# Altium footprint library FootPrintLib_9.PcbLib: 287 footprints (part 17 of 18)
Each footprint in its own frame and in the unit in brackets; x right, y up, seen from the top. Pads: shape width x height; smd on the part's side, far side on the other; paste and mask are expansions set on the pad; w line width, h text height; cw(c..) or ccw(c..) is an arc to the next point about the centre after c.
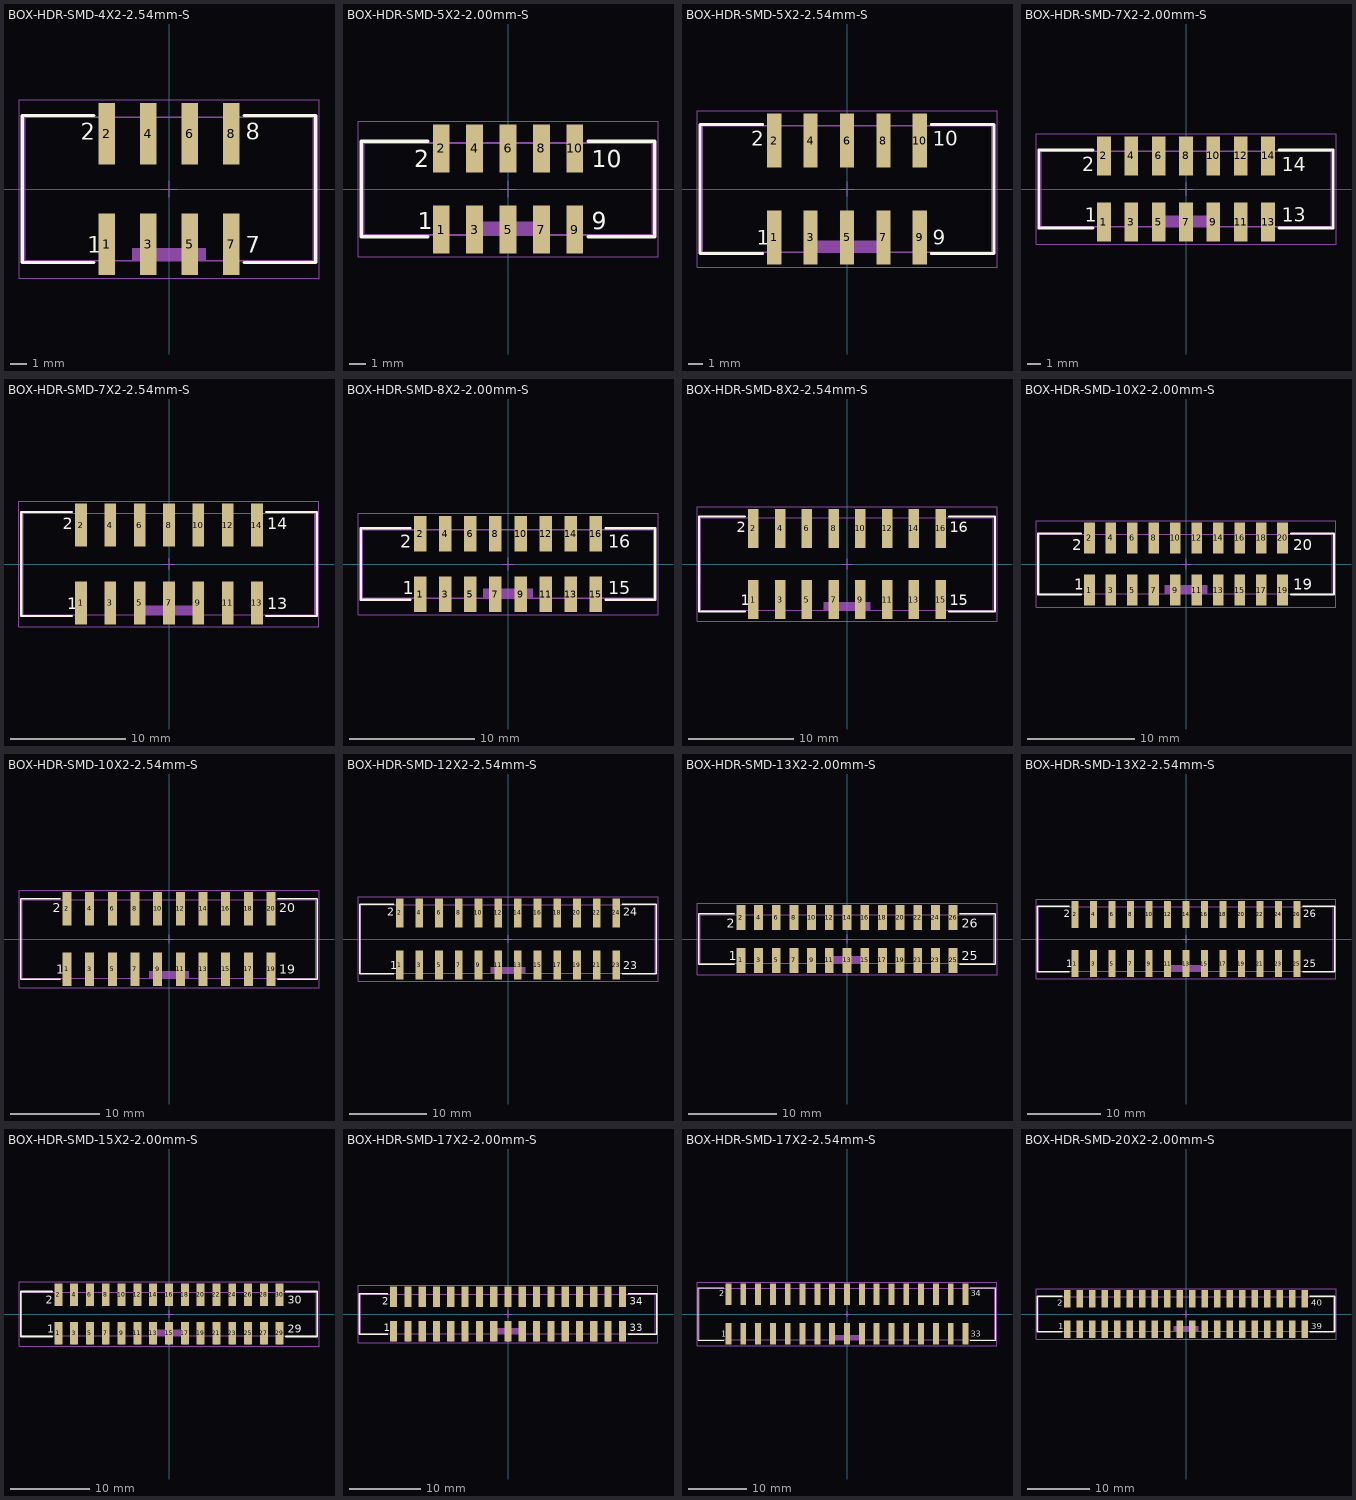
[diagram p16: the footprints below, top view; thin cyan lines are the x and y axes]

## BOX-HDR-SMD-4X2-2.54mm-S [mm] "8 pins, SMT, straight, gold plating"
height 9.2
pads (8):
  rect 1x3.75 smd: 1(-3.81,-3.375) 2(-3.81,3.375) 3(-1.27,-3.375) 4(-1.27,3.375) 5(1.27,-3.375) 6(1.27,3.375) 7(3.81,-3.375) 8(3.81,3.375)
Top Overlay:
  lines w0.2: -4.6,-4.5 -8.98,-4.5 -8.98,4.5 -4.6,4.5 ; 4.6,-4.5 8.98,-4.5 8.98,4.5 4.6,4.5
  text "7" at 4.7,-3.9 h1.02
  text "2" at -5.4,3 h1.02
  text "1" at -5,-3.9 h1.02
  text "8" at 4.7,3 h1.02
Mechanical 13:
  rectangle: -2.25,-4.4 2.25,-3.6
  lines w0.1: -8.83,-4.4 -8.83,4.4 8.83,4.4 8.83,-4.4 -8.83,-4.4
Mechanical 15:
  lines w0.05: -0.5,0 0.5,0 ; 0,-0.5 0,0.5 ; -9.18,-5.45 9.18,-5.45 9.18,5.45 -9.18,5.45 -9.18,-5.45
3D body "61200820621.stp": height 10.2, standoff 0.01, extent -8.89,-4.75 8.89,4.75

## BOX-HDR-SMD-5X2-2.00mm-S [mm] "2.00mm Male SMT Box Header, 10p"
height 6.8
pads (10):
  rect 1x2.85 smd: 1(-4,-2.425) 2(-4,2.425) 3(-2,-2.425) 4(-2,2.425) 5(0,-2.425) 6(0,2.425) 7(2,-2.425) 8(2,2.425) 9(4,-2.425) 10(4,2.425)
Top Overlay:
  lines w0.2: -4.8,-2.85 -8.775,-2.85 -8.775,2.85 -4.8,2.85 ; 4.8,-2.85 8.775,-2.85 8.775,2.85 4.8,2.85
  text "10" at 5,1.3 h1.02
  text "9" at 5,-2.4 h1.02
  text "2" at -5.6,1.3 h1.02
  text "1" at -5.4,-2.4 h1.02
Mechanical 13:
  rectangle: -2,-2.75 2,-1.95
  lines w0.1: -4.25,-2.75 -4.25,-3.75 -3.75,-3.75 -3.75,-2.75 ; -4.25,2.75 -4.25,3.75 -3.75,3.75 -3.75,2.75 ; -2.25,-2.75 -2.25,-3.75 -1.75,-3.75 -1.75,-2.75 ; -2.25,2.75 -2.25,3.75 -1.75,3.75 -1.75,2.75 ; -0.25,-2.75 -0.25,-3.75 0.25,-3.75 0.25,-2.75 ; -0.25,2.75 -0.25,3.75 0.25,3.75 0.25,2.75 ; 1.75,-2.75 1.75,-3.75 2.25,-3.75 2.25,-2.75 ; 1.75,2.75 1.75,3.75 2.25,3.75 2.25,2.75 ; 3.75,-2.75 3.75,-3.75 4.25,-3.75 4.25,-2.75 ; 3.75,2.75 3.75,3.75 4.25,3.75 4.25,2.75 ; -8.625,-2.75 8.625,-2.75 8.625,2.75 -8.625,2.75 -8.625,-2.75
Mechanical 15:
  lines w0.05: -0.5,0 0.5,0 ; 0,-0.5 0,0.5 ; -8.975,-4.05 -8.975,4.05 8.975,4.05 8.975,-4.05 -8.975,-4.05
3D body "62531020621 (rev1).stp": height 8.55, standoff 0, extent -8.625,-3.75 8.625,3.75

## BOX-HDR-SMD-5X2-2.54mm-S [mm] "10 pins, SMT, straight, gold plating"
height 9.2
pads (10):
  rect 1x3.75 smd: 1(-5.08,-3.375) 2(-5.08,3.375) 3(-2.54,-3.375) 4(-2.54,3.375) 5(0,-3.375) 6(0,3.375) 7(2.54,-3.375) 8(2.54,3.375) 9(5.08,-3.375) 10(5.08,3.375)
Top Overlay:
  lines w0.2: -5.87,-4.5 -10.25,-4.5 -10.25,4.5 -5.87,4.5 ; 5.87,-4.5 10.25,-4.5 10.25,4.5 5.87,4.5
  text "9" at 5.97,-3.9 h1.02
  text "10" at 5.97,3 h1.02
  text "2" at -6.67,3 h1.02
  text "1" at -6.27,-3.9 h1.02
Mechanical 13:
  rectangle: -2.25,-4.4 2.25,-3.6
  lines w0.1: -10.1,-4.4 -10.1,4.4 10.1,4.4 10.1,-4.4 -10.1,-4.4
Mechanical 15:
  lines w0.05: -0.5,0 0.5,0 ; 0,-0.5 0,0.5 ; -10.45,-5.45 10.45,-5.45 10.45,5.45 -10.45,5.45 -10.45,-5.45
3D body "61201020621.stp": height 10.2, standoff 0.01, extent -10.16,-4.75 10.16,4.75

## BOX-HDR-SMD-7X2-2.00mm-S [mm] "2.00mm Male SMT Box Header, 14p"
height 6.8
pads (14):
  rect 1x2.85 smd: 1(-6,-2.425) 2(-6,2.425) 3(-4,-2.425) 4(-4,2.425) 5(-2,-2.425) 6(-2,2.425) 7(0,-2.425) 8(0,2.425) 9(2,-2.425) 10(2,2.425) 11(4,-2.425) 12(4,2.425) 13(6,-2.425) 14(6,2.425)
Top Overlay:
  lines w0.2: -6.8,-2.85 -10.775,-2.85 -10.775,2.85 -6.8,2.85 ; 6.8,-2.85 10.775,-2.85 10.775,2.85 6.8,2.85
  text "13" at 7,-2.4 h1.02
  text "14" at 7,1.3 h1.02
  text "1" at -7.4,-2.4 h1.02
  text "2" at -7.6,1.3 h1.02
Mechanical 13:
  rectangle: -2,-2.75 2,-1.95
  lines w0.1: -6.25,-2.75 -6.25,-3.75 -5.75,-3.75 -5.75,-2.75 ; -6.25,2.75 -6.25,3.75 -5.75,3.75 -5.75,2.75 ; -4.25,-2.75 -4.25,-3.75 -3.75,-3.75 -3.75,-2.75 ; -4.25,2.75 -4.25,3.75 -3.75,3.75 -3.75,2.75 ; -2.25,-2.75 -2.25,-3.75 -1.75,-3.75 -1.75,-2.75 ; -2.25,2.75 -2.25,3.75 -1.75,3.75 -1.75,2.75 ; -0.25,-2.75 -0.25,-3.75 0.25,-3.75 0.25,-2.75 ; -0.25,2.75 -0.25,3.75 0.25,3.75 0.25,2.75 ; 1.75,-2.75 1.75,-3.75 2.25,-3.75 2.25,-2.75 ; 1.75,2.75 1.75,3.75 2.25,3.75 2.25,2.75 ; 3.75,-2.75 3.75,-3.75 4.25,-3.75 4.25,-2.75 ; 3.75,2.75 3.75,3.75 4.25,3.75 4.25,2.75 ; 5.75,-2.75 5.75,-3.75 6.25,-3.75 6.25,-2.75 ; 5.75,2.75 5.75,3.75 6.25,3.75 6.25,2.75 ; -10.625,-2.75 -10.625,2.75 10.625,2.75 10.625,-2.75 -10.625,-2.75
Mechanical 15:
  lines w0.05: -0.5,0 0.5,0 ; 0,-0.5 0,0.5 ; -10.975,-4.05 10.975,-4.05 10.975,4.05 -10.975,4.05 -10.975,-4.05
3D body "62531420621 (rev1).stp": height 8.55, standoff 0, extent -10.625,-3.75 10.625,3.75

## BOX-HDR-SMD-7X2-2.54mm-S [mm] "14 pins, SMT, straight, gold plating"
height 9.2
pads (14):
  rect 1x3.75 smd: 1(-7.62,-3.375) 2(-7.62,3.375) 3(-5.08,-3.375) 4(-5.08,3.375) 5(-2.54,-3.375) 6(-2.54,3.375) 7(0,-3.375) 8(0,3.375) 9(2.54,-3.375) 10(2.54,3.375) 11(5.08,-3.375) 12(5.08,3.375) 13(7.62,-3.375) 14(7.62,3.375)
Top Overlay:
  lines w0.2: -8.41,-4.5 -12.79,-4.5 -12.79,4.5 -8.41,4.5 ; 8.41,-4.5 12.79,-4.5 12.79,4.5 8.41,4.5
  text "13" at 8.51,-3.9 h1.02
  text "14" at 8.51,3 h1.02
  text "2" at -9.21,3 h1.02
  text "1" at -8.81,-3.9 h1.02
Mechanical 13:
  rectangle: -2.25,-4.4 2.25,-3.6
  lines w0.1: -12.64,-4.4 -12.64,4.4 12.64,4.4 12.64,-4.4 -12.64,-4.4
Mechanical 15:
  lines w0.05: -0.5,0 0.5,0 ; 0,-0.5 0,0.5 ; -12.99,-5.45 12.99,-5.45 12.99,5.45 -12.99,5.45 -12.99,-5.45
3D body "61201420621.stp": height 10.2, standoff 0.01, extent -12.7,-4.75 12.7,4.75

## BOX-HDR-SMD-8X2-2.00mm-S [mm] "2.00mm Male SMT Box Header, 16p"
height 6.8
pads (16):
  rect 1x2.85 smd: 1(-7,-2.425) 2(-7,2.425) 3(-5,-2.425) 4(-5,2.425) 5(-3,-2.425) 6(-3,2.425) 7(-1,-2.425) 8(-1,2.425) 9(1,-2.425) 10(1,2.425) 11(3,-2.425) 12(3,2.425) 13(5,-2.425) 14(5,2.425) 15(7,-2.425) 16(7,2.425)
Top Overlay:
  lines w0.2: -7.8,-2.85 -11.775,-2.85 -11.775,2.85 -7.8,2.85 ; 7.8,-2.85 11.775,-2.85 11.775,2.85 7.8,2.85
  text "1" at -8.4,-2.4 h1.02
  text "2" at -8.6,1.3 h1.02
  text "16" at 8,1.3 h1.02
  text "15" at 8,-2.4 h1.02
Mechanical 13:
  rectangle: -2,-2.75 2,-1.95
  lines w0.1: -7.25,-2.75 -7.25,-3.75 -6.75,-3.75 -6.75,-2.75 ; -7.25,2.75 -7.25,3.75 -6.75,3.75 -6.75,2.75 ; -5.25,-2.75 -5.25,-3.75 -4.75,-3.75 -4.75,-2.75 ; -5.25,2.75 -5.25,3.75 -4.75,3.75 -4.75,2.75 ; -3.25,-2.75 -3.25,-3.75 -2.75,-3.75 -2.75,-2.75 ; -3.25,2.75 -3.25,3.75 -2.75,3.75 -2.75,2.75 ; -1.25,-2.75 -1.25,-3.75 -0.75,-3.75 -0.75,-2.75 ; -1.25,2.75 -1.25,3.75 -0.75,3.75 -0.75,2.75 ; 0.75,-2.75 0.75,-3.75 1.25,-3.75 1.25,-2.75 ; 0.75,2.75 0.75,3.75 1.25,3.75 1.25,2.75 ; 2.75,-2.75 2.75,-3.75 3.25,-3.75 3.25,-2.75 ; 2.75,2.75 2.75,3.75 3.25,3.75 3.25,2.75 ; 4.75,-2.75 4.75,-3.75 5.25,-3.75 5.25,-2.75 ; 4.75,2.75 4.75,3.75 5.25,3.75 5.25,2.75 ; 6.75,-2.75 6.75,-3.75 7.25,-3.75 7.25,-2.75 ; 6.75,2.75 6.75,3.75 7.25,3.75 7.25,2.75 ; -11.625,-2.75 -11.625,2.75 11.625,2.75 11.625,-2.75 -11.625,-2.75
Mechanical 15:
  lines w0.05: -0.5,0 0.5,0 ; 0,-0.5 0,0.5 ; -11.975,-4.05 11.975,-4.05 11.975,4.05 -11.975,4.05 -11.975,-4.05
3D body "62531620621 (rev1).stp": height 8.55, standoff 0, extent -11.625,-3.75 11.625,3.75

## BOX-HDR-SMD-8X2-2.54mm-S [mm] "16 pins, SMT, straight, gold plating"
height 9.2
pads (16):
  rect 1x3.75 smd: 1(-8.89,-3.375) 2(-8.89,3.375) 3(-6.35,-3.375) 4(-6.35,3.375) 5(-3.81,-3.375) 6(-3.81,3.375) 7(-1.27,-3.375) 8(-1.27,3.375) 9(1.27,-3.375) 10(1.27,3.375) 11(3.81,-3.375) 12(3.81,3.375) 13(6.35,-3.375) 14(6.35,3.375) 15(8.89,-3.375) 16(8.89,3.375)
Top Overlay:
  lines w0.2: -9.68,-4.5 -14.06,-4.5 -14.06,4.5 -9.68,4.5 ; 9.68,-4.5 14.06,-4.5 14.06,4.5 9.68,4.5
  text "15" at 9.78,-3.9 h1.02
  text "16" at 9.78,3 h1.02
  text "1" at -10.08,-3.9 h1.02
  text "2" at -10.48,3 h1.02
Mechanical 13:
  rectangle: -2.25,-4.4 2.25,-3.6
  lines w0.1: -13.91,-4.4 13.91,-4.4 13.91,4.4 -13.91,4.4 -13.91,-4.4
Mechanical 15:
  lines w0.05: -0.5,0 0.5,0 ; 0,-0.5 0,0.5 ; -14.26,-5.45 -14.26,5.45 14.26,5.45 14.26,-5.45 -14.26,-5.45
3D body "61201620621.stp": height 10.2, standoff 0.01, extent -13.97,-4.75 13.97,4.75

## BOX-HDR-SMD-10X2-2.00mm-S [mm] "2.00mm Male SMT Box Header, 20p"
height 6.8
pads (20):
  rect 1x2.85 smd: 1(-9,-2.425) 2(-9,2.425) 3(-7,-2.425) 4(-7,2.425) 5(-5,-2.425) 6(-5,2.425) 7(-3,-2.425) 8(-3,2.425) 9(-1,-2.425) 10(-1,2.425) 11(1,-2.425) 12(1,2.425) 13(3,-2.425) 14(3,2.425) 15(5,-2.425) 16(5,2.425) 17(7,-2.425) 18(7,2.425) 19(9,-2.425) 20(9,2.425)
Top Overlay:
  lines w0.2: -9.8,-2.85 -13.775,-2.85 -13.775,2.85 -9.8,2.85 ; 9.8,-2.85 13.775,-2.85 13.775,2.85 9.8,2.85
  text "1" at -10.4,-2.4 h1.02
  text "2" at -10.6,1.3 h1.02
  text "20" at 10,1.3 h1.02
  text "19" at 10,-2.4 h1.02
Mechanical 13:
  rectangle: -2,-2.75 2,-1.95
  lines w0.1: -9.25,-2.75 -9.25,-3.75 -8.75,-3.75 -8.75,-2.75 ; -9.25,2.75 -9.25,3.75 -8.75,3.75 -8.75,2.75 ; -7.25,-2.75 -7.25,-3.75 -6.75,-3.75 -6.75,-2.75 ; -7.25,2.75 -7.25,3.75 -6.75,3.75 -6.75,2.75 ; -5.25,-2.75 -5.25,-3.75 -4.75,-3.75 -4.75,-2.75 ; -5.25,2.75 -5.25,3.75 -4.75,3.75 -4.75,2.75 ; -3.25,-2.75 -3.25,-3.75 -2.75,-3.75 -2.75,-2.75 ; -3.25,2.75 -3.25,3.75 -2.75,3.75 -2.75,2.75 ; -1.25,-2.75 -1.25,-3.75 -0.75,-3.75 -0.75,-2.75 ; -1.25,2.75 -1.25,3.75 -0.75,3.75 -0.75,2.75 ; 0.75,-2.75 0.75,-3.75 1.25,-3.75 1.25,-2.75 ; 0.75,2.75 0.75,3.75 1.25,3.75 1.25,2.75 ; 2.75,-2.75 2.75,-3.75 3.25,-3.75 3.25,-2.75 ; 2.75,2.75 2.75,3.75 3.25,3.75 3.25,2.75 ; 4.75,-2.75 4.75,-3.75 5.25,-3.75 5.25,-2.75 ; 4.75,2.75 4.75,3.75 5.25,3.75 5.25,2.75 ; 6.75,-2.75 6.75,-3.75 7.25,-3.75 7.25,-2.75 ; 6.75,2.75 6.75,3.75 7.25,3.75 7.25,2.75 ; 8.75,-2.75 8.75,-3.75 9.25,-3.75 9.25,-2.75 ; 8.75,2.75 8.75,3.75 9.25,3.75 9.25,2.75 ; -13.625,-2.75 -13.625,2.75 13.625,2.75 13.625,-2.75 -13.625,-2.75
Mechanical 15:
  lines w0.05: -0.5,0 0.5,0 ; 0,-0.5 0,0.5 ; -13.975,-4.05 13.975,-4.05 13.975,4.05 -13.975,4.05 -13.975,-4.05
3D body "62532020621 (rev1).stp": height 8.55, standoff 0, extent -13.625,-3.75 13.625,3.75

## BOX-HDR-SMD-10X2-2.54mm-S [mm] "20 pins, SMT, straight, gold plating"
height 9.2
pads (20):
  rect 1x3.75 smd: 1(-11.43,-3.375) 2(-11.43,3.375) 3(-8.89,-3.375) 4(-8.89,3.375) 5(-6.35,-3.375) 6(-6.35,3.375) 7(-3.81,-3.375) 8(-3.81,3.375) 9(-1.27,-3.375) 10(-1.27,3.375) 11(1.27,-3.375) 12(1.27,3.375) 13(3.81,-3.375) 14(3.81,3.375) 15(6.35,-3.375) 16(6.35,3.375) 17(8.89,-3.375) 18(8.89,3.375) 19(11.43,-3.375) 20(11.43,3.375)
Top Overlay:
  lines w0.2: -12.22,-4.5 -16.6,-4.5 -16.6,4.5 -12.22,4.5 ; 12.22,-4.5 16.6,-4.5 16.6,4.5 12.22,4.5
  text "19" at 12.32,-3.9 h1.02
  text "20" at 12.32,3 h1.02
  text "1" at -12.62,-3.9 h1.02
  text "2" at -13.02,3 h1.02
Mechanical 13:
  rectangle: -2.25,-4.4 2.25,-3.6
  lines w0.1: -16.45,-4.4 16.45,-4.4 16.45,4.4 -16.45,4.4 -16.45,-4.4
Mechanical 15:
  lines w0.05: -0.5,0 0.5,0 ; 0,-0.5 0,0.5 ; -16.8,-5.45 -16.8,5.45 16.8,5.45 16.8,-5.45 -16.8,-5.45
3D body "61202020621.stp": height 10.2, standoff 0.01, extent -16.51,-4.75 16.51,4.75

## BOX-HDR-SMD-12X2-2.54mm-S [mm] "24 pins, SMT, straight, gold plating"
height 9.2
pads (24):
  rect 1x3.75 smd: 1(-13.97,-3.375) 2(-13.97,3.375) 3(-11.43,-3.375) 4(-11.43,3.375) 5(-8.89,-3.375) 6(-8.89,3.375) 7(-6.35,-3.375) 8(-6.35,3.375) 9(-3.81,-3.375) 10(-3.81,3.375) 11(-1.27,-3.375) 12(-1.27,3.375) 13(1.27,-3.375) 14(1.27,3.375) 15(3.81,-3.375) 16(3.81,3.375) 17(6.35,-3.375) 18(6.35,3.375) 19(8.89,-3.375) 20(8.89,3.375) 21(11.43,-3.375) 22(11.43,3.375) 23(13.97,-3.375) 24(13.97,3.375)
Top Overlay:
  lines w0.2: -14.76,-4.5 -19.14,-4.5 -19.14,4.5 -14.76,4.5 ; 14.76,-4.5 19.14,-4.5 19.14,4.5 14.76,4.5
  text "1" at -15.16,-3.9 h1.02
  text "2" at -15.56,3 h1.02
  text "24" at 14.86,3 h1.02
  text "23" at 14.86,-3.9 h1.02
Mechanical 13:
  rectangle: -2.25,-4.4 2.25,-3.6
  lines w0.1: -18.99,-4.4 18.99,-4.4 18.99,4.4 -18.99,4.4 -18.99,-4.4
Mechanical 15:
  lines w0.05: -0.5,0 0.5,0 ; 0,-0.5 0,0.5 ; -19.34,-5.45 -19.34,5.45 19.34,5.45 19.34,-5.45 -19.34,-5.45
3D body "61202420621.stp": height 10.2, standoff 0.01, extent -19.05,-4.75 19.05,4.75

## BOX-HDR-SMD-13X2-2.00mm-S [mm] "2.00mm Male SMT Box Header, 26p"
height 6.8
pads (26):
  rect 1x2.85 smd: 1(-12,-2.425) 2(-12,2.425) 3(-10,-2.425) 4(-10,2.425) 5(-8,-2.425) 6(-8,2.425) 7(-6,-2.425) 8(-6,2.425) 9(-4,-2.425) 10(-4,2.425) 11(-2,-2.425) 12(-2,2.425) 13(0,-2.425) 14(0,2.425) 15(2,-2.425) 16(2,2.425) 17(4,-2.425) 18(4,2.425) 19(6,-2.425) 20(6,2.425) 21(8,-2.425) 22(8,2.425) 23(10,-2.425) 24(10,2.425) 25(12,-2.425) 26(12,2.425)
Top Overlay:
  lines w0.2: -12.8,-2.85 -16.775,-2.85 -16.775,2.85 -12.8,2.85 ; 12.8,-2.85 16.775,-2.85 16.775,2.85 12.8,2.85
  text "2" at -13.6,1.3 h1.02
  text "1" at -13.4,-2.4 h1.02
  text "26" at 13,1.3 h1.02
  text "25" at 13,-2.4 h1.02
Mechanical 13:
  rectangle: -2,-2.75 2,-1.95
  lines w0.1: -12.25,-2.75 -12.25,-3.75 -11.75,-3.75 -11.75,-2.75 ; -12.25,2.75 -12.25,3.75 -11.75,3.75 -11.75,2.75 ; -10.25,-2.75 -10.25,-3.75 -9.75,-3.75 -9.75,-2.75 ; -10.25,2.75 -10.25,3.75 -9.75,3.75 -9.75,2.75 ; -8.25,-2.75 -8.25,-3.75 -7.75,-3.75 -7.75,-2.75 ; -8.25,2.75 -8.25,3.75 -7.75,3.75 -7.75,2.75 ; -6.25,-2.75 -6.25,-3.75 -5.75,-3.75 -5.75,-2.75 ; -6.25,2.75 -6.25,3.75 -5.75,3.75 -5.75,2.75 ; -4.25,-2.75 -4.25,-3.75 -3.75,-3.75 -3.75,-2.75 ; -4.25,2.75 -4.25,3.75 -3.75,3.75 -3.75,2.75 ; -2.25,-2.75 -2.25,-3.75 -1.75,-3.75 -1.75,-2.75 ; -2.25,2.75 -2.25,3.75 -1.75,3.75 -1.75,2.75 ; -0.25,-2.75 -0.25,-3.75 0.25,-3.75 0.25,-2.75 ; -0.25,2.75 -0.25,3.75 0.25,3.75 0.25,2.75 ; 1.75,-2.75 1.75,-3.75 2.25,-3.75 2.25,-2.75 ; 1.75,2.75 1.75,3.75 2.25,3.75 2.25,2.75 ; 3.75,-2.75 3.75,-3.75 4.25,-3.75 4.25,-2.75 ; 3.75,2.75 3.75,3.75 4.25,3.75 4.25,2.75 ; 5.75,-2.75 5.75,-3.75 6.25,-3.75 6.25,-2.75 ; 5.75,2.75 5.75,3.75 6.25,3.75 6.25,2.75 ; 7.75,-2.75 7.75,-3.75 8.25,-3.75 8.25,-2.75 ; 7.75,2.75 7.75,3.75 8.25,3.75 8.25,2.75 ; 9.75,-2.75 9.75,-3.75 10.25,-3.75 10.25,-2.75 ; 9.75,2.75 9.75,3.75 10.25,3.75 10.25,2.75 ; 11.75,-2.75 11.75,-3.75 12.25,-3.75 12.25,-2.75 ; 11.75,2.75 11.75,3.75 12.25,3.75 12.25,2.75 ; -16.625,-2.75 16.625,-2.75 16.625,2.75 -16.625,2.75 -16.625,-2.75
Mechanical 15:
  lines w0.05: -0.5,0 0.5,0 ; 0,-0.5 0,0.5 ; -16.975,-4.05 -16.975,4.05 16.975,4.05 16.975,-4.05 -16.975,-4.05
3D body "62532620621 (rev1).stp": height 8.55, standoff 0, extent -16.625,-3.75 16.625,3.75

## BOX-HDR-SMD-13X2-2.54mm-S [mm] "26 pins, SMT, straight, gold plating"
height 9.2
pads (26):
  rect 1x3.75 smd: 1(-15.24,-3.375) 2(-15.24,3.375) 3(-12.7,-3.375) 4(-12.7,3.375) 5(-10.16,-3.375) 6(-10.16,3.375) 7(-7.62,-3.375) 8(-7.62,3.375) 9(-5.08,-3.375) 10(-5.08,3.375) 11(-2.54,-3.375) 12(-2.54,3.375) 13(0,-3.375) 14(0,3.375) 15(2.54,-3.375) 16(2.54,3.375) 17(5.08,-3.375) 18(5.08,3.375) 19(7.62,-3.375) 20(7.62,3.375) 21(10.16,-3.375) 22(10.16,3.375) 23(12.7,-3.375) 24(12.7,3.375) 25(15.24,-3.375) 26(15.24,3.375)
Top Overlay:
  lines w0.2: -16.03,-4.5 -20.41,-4.5 -20.41,4.5 -16.03,4.5 ; 16.03,-4.5 20.41,-4.5 20.41,4.5 16.03,4.5
  text "25" at 16.13,-3.9 h1.02
  text "26" at 16.13,3 h1.02
  text "1" at -16.43,-3.9 h1.02
  text "2" at -16.83,3 h1.02
Mechanical 13:
  rectangle: -2.25,-4.4 2.25,-3.6
  lines w0.1: -20.26,-4.4 20.26,-4.4 20.26,4.4 -20.26,4.4 -20.26,-4.4
Mechanical 15:
  lines w0.05: -0.5,0 0.5,0 ; 0,-0.5 0,0.5 ; -20.61,-5.45 -20.61,5.45 20.61,5.45 20.61,-5.45 -20.61,-5.45
3D body "61202620621.stp": height 10.2, standoff 0.01, extent -20.32,-4.75 20.32,4.75

## BOX-HDR-SMD-15X2-2.00mm-S [mm] "2.00mm Male SMT Box Header, 30p"
height 6.8
pads (30):
  rect 1x2.85 smd: 1(-14,-2.425) 2(-14,2.425) 3(-12,-2.425) 4(-12,2.425) 5(-10,-2.425) 6(-10,2.425) 7(-8,-2.425) 8(-8,2.425) 9(-6,-2.425) 10(-6,2.425) 11(-4,-2.425) 12(-4,2.425) 13(-2,-2.425) 14(-2,2.425) 15(0,-2.425) 16(0,2.425) 17(2,-2.425) 18(2,2.425) 19(4,-2.425) 20(4,2.425) 21(6,-2.425) 22(6,2.425) 23(8,-2.425) 24(8,2.425) 25(10,-2.425) 26(10,2.425) 27(12,-2.425) 28(12,2.425) 29(14,-2.425) 30(14,2.425)
Top Overlay:
  lines w0.2: -14.8,-2.85 -18.775,-2.85 -18.775,2.85 -14.8,2.85 ; 14.8,-2.85 18.775,-2.85 18.775,2.85 14.8,2.85
  text "1" at -15.4,-2.4 h1.02
  text "2" at -15.6,1.3 h1.02
  text "30" at 15,1.3 h1.02
  text "29" at 15,-2.4 h1.02
Mechanical 13:
  rectangle: -2,-2.75 2,-1.95
  lines w0.1: -14.25,-2.75 -14.25,-3.75 -13.75,-3.75 -13.75,-2.75 ; -14.25,2.75 -14.25,3.75 -13.75,3.75 -13.75,2.75 ; -12.25,-2.75 -12.25,-3.75 -11.75,-3.75 -11.75,-2.75 ; -12.25,2.75 -12.25,3.75 -11.75,3.75 -11.75,2.75 ; -10.25,-2.75 -10.25,-3.75 -9.75,-3.75 -9.75,-2.75 ; -10.25,2.75 -10.25,3.75 -9.75,3.75 -9.75,2.75 ; -8.25,-2.75 -8.25,-3.75 -7.75,-3.75 -7.75,-2.75 ; -8.25,2.75 -8.25,3.75 -7.75,3.75 -7.75,2.75 ; -6.25,-2.75 -6.25,-3.75 -5.75,-3.75 -5.75,-2.75 ; -6.25,2.75 -6.25,3.75 -5.75,3.75 -5.75,2.75 ; -4.25,-2.75 -4.25,-3.75 -3.75,-3.75 -3.75,-2.75 ; -4.25,2.75 -4.25,3.75 -3.75,3.75 -3.75,2.75 ; -2.25,-2.75 -2.25,-3.75 -1.75,-3.75 -1.75,-2.75 ; -2.25,2.75 -2.25,3.75 -1.75,3.75 -1.75,2.75 ; -0.25,-2.75 -0.25,-3.75 0.25,-3.75 0.25,-2.75 ; -0.25,2.75 -0.25,3.75 0.25,3.75 0.25,2.75 ; 1.75,-2.75 1.75,-3.75 2.25,-3.75 2.25,-2.75 ; 1.75,2.75 1.75,3.75 2.25,3.75 2.25,2.75 ; 3.75,-2.75 3.75,-3.75 4.25,-3.75 4.25,-2.75 ; 3.75,2.75 3.75,3.75 4.25,3.75 4.25,2.75 ; 5.75,-2.75 5.75,-3.75 6.25,-3.75 6.25,-2.75 ; 5.75,2.75 5.75,3.75 6.25,3.75 6.25,2.75 ; 7.75,-2.75 7.75,-3.75 8.25,-3.75 8.25,-2.75 ; 7.75,2.75 7.75,3.75 8.25,3.75 8.25,2.75 ; 9.75,-2.75 9.75,-3.75 10.25,-3.75 10.25,-2.75 ; 9.75,2.75 9.75,3.75 10.25,3.75 10.25,2.75 ; 11.75,-2.75 11.75,-3.75 12.25,-3.75 12.25,-2.75 ; 11.75,2.75 11.75,3.75 12.25,3.75 12.25,2.75 ; 13.75,-2.75 13.75,-3.75 14.25,-3.75 14.25,-2.75 ; 13.75,2.75 13.75,3.75 14.25,3.75 14.25,2.75 ; -18.625,-2.75 -18.625,2.75 18.625,2.75 18.625,-2.75 -18.625,-2.75
Mechanical 15:
  lines w0.05: -0.5,0 0.5,0 ; 0,-0.5 0,0.5 ; -18.975,-4.05 18.975,-4.05 18.975,4.05 -18.975,4.05 -18.975,-4.05
3D body "62533020621 (rev1).stp": height 8.55, standoff 0, extent -18.625,-3.75 18.625,3.75

## BOX-HDR-SMD-17X2-2.00mm-S [mm] "2.00mm Male SMT Box Header, 34p"
height 6.8
pads (34):
  rect 1x2.85 smd: 1(-16,-2.425) 2(-16,2.425) 3(-14,-2.425) 4(-14,2.425) 5(-12,-2.425) 6(-12,2.425) 7(-10,-2.425) 8(-10,2.425) 9(-8,-2.425) 10(-8,2.425) 11(-6,-2.425) 12(-6,2.425) 13(-4,-2.425) 14(-4,2.425) 15(-2,-2.425) 16(-2,2.425) 17(0,-2.425) 18(0,2.425) 19(2,-2.425) 20(2,2.425) 21(4,-2.425) 22(4,2.425) 23(6,-2.425) 24(6,2.425) 25(8,-2.425) 26(8,2.425) 27(10,-2.425) 28(10,2.425) 29(12,-2.425) 30(12,2.425) 31(14,-2.425) 32(14,2.425) 33(16,-2.425) 34(16,2.425)
Top Overlay:
  lines w0.2: -16.8,-2.85 -20.775,-2.85 -20.775,2.85 -16.8,2.85 ; 16.8,-2.85 20.775,-2.85 20.775,2.85 16.8,2.85
  text "2" at -17.6,1.3 h1.02
  text "1" at -17.4,-2.4 h1.02
  text "34" at 17,1.3 h1.02
  text "33" at 17,-2.4 h1.02
Mechanical 13:
  rectangle: -2,-2.75 2,-1.95
  lines w0.1: -16.25,-2.75 -16.25,-3.75 -15.75,-3.75 -15.75,-2.75 ; -16.25,2.75 -16.25,3.75 -15.75,3.75 -15.75,2.75 ; -14.25,-2.75 -14.25,-3.75 -13.75,-3.75 -13.75,-2.75 ; -14.25,2.75 -14.25,3.75 -13.75,3.75 -13.75,2.75 ; -12.25,-2.75 -12.25,-3.75 -11.75,-3.75 -11.75,-2.75 ; -12.25,2.75 -12.25,3.75 -11.75,3.75 -11.75,2.75 ; -10.25,-2.75 -10.25,-3.75 -9.75,-3.75 -9.75,-2.75 ; -10.25,2.75 -10.25,3.75 -9.75,3.75 -9.75,2.75 ; -8.25,-2.75 -8.25,-3.75 -7.75,-3.75 -7.75,-2.75 ; -8.25,2.75 -8.25,3.75 -7.75,3.75 -7.75,2.75 ; -6.25,-2.75 -6.25,-3.75 -5.75,-3.75 -5.75,-2.75 ; -6.25,2.75 -6.25,3.75 -5.75,3.75 -5.75,2.75 ; -4.25,-2.75 -4.25,-3.75 -3.75,-3.75 -3.75,-2.75 ; -4.25,2.75 -4.25,3.75 -3.75,3.75 -3.75,2.75 ; -2.25,-2.75 -2.25,-3.75 -1.75,-3.75 -1.75,-2.75 ; -2.25,2.75 -2.25,3.75 -1.75,3.75 -1.75,2.75 ; -0.25,-2.75 -0.25,-3.75 0.25,-3.75 0.25,-2.75 ; -0.25,2.75 -0.25,3.75 0.25,3.75 0.25,2.75 ; 1.75,-2.75 1.75,-3.75 2.25,-3.75 2.25,-2.75 ; 1.75,2.75 1.75,3.75 2.25,3.75 2.25,2.75 ; 3.75,-2.75 3.75,-3.75 4.25,-3.75 4.25,-2.75 ; 3.75,2.75 3.75,3.75 4.25,3.75 4.25,2.75 ; 5.75,-2.75 5.75,-3.75 6.25,-3.75 6.25,-2.75 ; 5.75,2.75 5.75,3.75 6.25,3.75 6.25,2.75 ; 7.75,-2.75 7.75,-3.75 8.25,-3.75 8.25,-2.75 ; 7.75,2.75 7.75,3.75 8.25,3.75 8.25,2.75 ; 9.75,-2.75 9.75,-3.75 10.25,-3.75 10.25,-2.75 ; 9.75,2.75 9.75,3.75 10.25,3.75 10.25,2.75 ; 11.75,-2.75 11.75,-3.75 12.25,-3.75 12.25,-2.75 ; 11.75,2.75 11.75,3.75 12.25,3.75 12.25,2.75 ; 13.75,-2.75 13.75,-3.75 14.25,-3.75 14.25,-2.75 ; 13.75,2.75 13.75,3.75 14.25,3.75 14.25,2.75 ; 15.75,-2.75 15.75,-3.75 16.25,-3.75 16.25,-2.75 ; 15.75,2.75 15.75,3.75 16.25,3.75 16.25,2.75 ; -20.625,-2.75 20.625,-2.75 20.625,2.75 -20.625,2.75 -20.625,-2.75
Mechanical 15:
  lines w0.05: -0.5,0 0.5,0 ; 0,-0.5 0,0.5 ; -20.975,-4.05 -20.975,4.05 20.975,4.05 20.975,-4.05 -20.975,-4.05
3D body "62533420621 (rev1).stp": height 8.55, standoff 0, extent -20.625,-3.75 20.625,3.75

## BOX-HDR-SMD-17X2-2.54mm-S [mm] "34 pins, SMT, straight, gold plating"
height 9.2
pads (34):
  rect 1x3.75 smd: 1(-20.32,-3.375) 2(-20.32,3.375) 3(-17.78,-3.375) 4(-17.78,3.375) 5(-15.24,-3.375) 6(-15.24,3.375) 7(-12.7,-3.375) 8(-12.7,3.375) 9(-10.16,-3.375) 10(-10.16,3.375) 11(-7.62,-3.375) 12(-7.62,3.375) 13(-5.08,-3.375) 14(-5.08,3.375) 15(-2.54,-3.375) 16(-2.54,3.375) 17(0,-3.375) 18(0,3.375) 19(2.54,-3.375) 20(2.54,3.375) 21(5.08,-3.375) 22(5.08,3.375) 23(7.62,-3.375) 24(7.62,3.375) 25(10.16,-3.375) 26(10.16,3.375) 27(12.7,-3.375) 28(12.7,3.375) 29(15.24,-3.375) 30(15.24,3.375) 31(17.78,-3.375) 32(17.78,3.375) 33(20.32,-3.375) 34(20.32,3.375)
Top Overlay:
  lines w0.2: -21.11,-4.5 -25.49,-4.5 -25.49,4.5 -21.11,4.5 ; 21.11,-4.5 25.49,-4.5 25.49,4.5 21.11,4.5
  text "2" at -21.91,3 h1.02
  text "1" at -21.51,-3.9 h1.02
  text "34" at 21.21,3 h1.02
  text "33" at 21.21,-3.9 h1.02
Mechanical 13:
  rectangle: -2.25,-4.4 2.25,-3.6
  lines w0.1: -25.34,-4.4 -25.34,4.4 25.34,4.4 25.34,-4.4 -25.34,-4.4
Mechanical 15:
  lines w0.05: -0.5,0 0.5,0 ; 0,-0.5 0,0.5 ; -25.69,-5.45 25.69,-5.45 25.69,5.45 -25.69,5.45 -25.69,-5.45
3D body "61203420621.stp": height 10.2, standoff 0.01, extent -25.4,-4.75 25.4,4.75

## BOX-HDR-SMD-20X2-2.00mm-S [mm] "2.00mm Male SMT Box Header, 40p"
height 6.8
pads (40):
  rect 1x2.85 smd: 1(-19,-2.425) 2(-19,2.425) 3(-17,-2.425) 4(-17,2.425) 5(-15,-2.425) 6(-15,2.425) 7(-13,-2.425) 8(-13,2.425) 9(-11,-2.425) 10(-11,2.425) 11(-9,-2.425) 12(-9,2.425) 13(-7,-2.425) 14(-7,2.425) 15(-5,-2.425) 16(-5,2.425) 17(-3,-2.425) 18(-3,2.425) 19(-1,-2.425) 20(-1,2.425) 21(1,-2.425) 22(1,2.425) 23(3,-2.425) 24(3,2.425) 25(5,-2.425) 26(5,2.425) 27(7,-2.425) 28(7,2.425) 29(9,-2.425) 30(9,2.425) 31(11,-2.425) 32(11,2.425) 33(13,-2.425) 34(13,2.425) 35(15,-2.425) 36(15,2.425) 37(17,-2.425) 38(17,2.425) 39(19,-2.425) 40(19,2.425)
Top Overlay:
  lines w0.2: -19.8,-2.85 -23.775,-2.85 -23.775,2.85 -19.8,2.85 ; 19.8,-2.85 23.775,-2.85 23.775,2.85 19.8,2.85
  text "1" at -20.4,-2.4 h1.02
  text "2" at -20.6,1.3 h1.02
  text "40" at 20,1.3 h1.02
  text "39" at 20,-2.4 h1.02
Mechanical 13:
  rectangle: -2,-2.75 2,-1.95
  lines w0.1: -19.25,-2.75 -19.25,-3.75 -18.75,-3.75 -18.75,-2.75 ; -19.25,2.75 -19.25,3.75 -18.75,3.75 -18.75,2.75 ; -17.25,-2.75 -17.25,-3.75 -16.75,-3.75 -16.75,-2.75 ; -17.25,2.75 -17.25,3.75 -16.75,3.75 -16.75,2.75 ; -15.25,-2.75 -15.25,-3.75 -14.75,-3.75 -14.75,-2.75 ; -15.25,2.75 -15.25,3.75 -14.75,3.75 -14.75,2.75 ; -13.25,-2.75 -13.25,-3.75 -12.75,-3.75 -12.75,-2.75 ; -13.25,2.75 -13.25,3.75 -12.75,3.75 -12.75,2.75 ; -11.25,-2.75 -11.25,-3.75 -10.75,-3.75 -10.75,-2.75 ; -11.25,2.75 -11.25,3.75 -10.75,3.75 -10.75,2.75 ; -9.25,-2.75 -9.25,-3.75 -8.75,-3.75 -8.75,-2.75 ; -9.25,2.75 -9.25,3.75 -8.75,3.75 -8.75,2.75 ; -7.25,-2.75 -7.25,-3.75 -6.75,-3.75 -6.75,-2.75 ; -7.25,2.75 -7.25,3.75 -6.75,3.75 -6.75,2.75 ; -5.25,-2.75 -5.25,-3.75 -4.75,-3.75 -4.75,-2.75 ; -5.25,2.75 -5.25,3.75 -4.75,3.75 -4.75,2.75 ; -3.25,-2.75 -3.25,-3.75 -2.75,-3.75 -2.75,-2.75 ; -3.25,2.75 -3.25,3.75 -2.75,3.75 -2.75,2.75 ; -1.25,-2.75 -1.25,-3.75 -0.75,-3.75 -0.75,-2.75 ; -1.25,2.75 -1.25,3.75 -0.75,3.75 -0.75,2.75 ; 0.75,-2.75 0.75,-3.75 1.25,-3.75 1.25,-2.75 ; 0.75,2.75 0.75,3.75 1.25,3.75 1.25,2.75 ; 2.75,-2.75 2.75,-3.75 3.25,-3.75 3.25,-2.75 ; 2.75,2.75 2.75,3.75 3.25,3.75 3.25,2.75 ; 4.75,-2.75 4.75,-3.75 5.25,-3.75 5.25,-2.75 ; 4.75,2.75 4.75,3.75 5.25,3.75 5.25,2.75 ; 6.75,-2.75 6.75,-3.75 7.25,-3.75 7.25,-2.75 ; 6.75,2.75 6.75,3.75 7.25,3.75 7.25,2.75 ; 8.75,-2.75 8.75,-3.75 9.25,-3.75 9.25,-2.75 ; 8.75,2.75 8.75,3.75 9.25,3.75 9.25,2.75 ; 10.75,-2.75 10.75,-3.75 11.25,-3.75 11.25,-2.75 ; 10.75,2.75 10.75,3.75 11.25,3.75 11.25,2.75 ; 12.75,-2.75 12.75,-3.75 13.25,-3.75 13.25,-2.75 ; 12.75,2.75 12.75,3.75 13.25,3.75 13.25,2.75 ; 14.75,-2.75 14.75,-3.75 15.25,-3.75 15.25,-2.75 ; 14.75,2.75 14.75,3.75 15.25,3.75 15.25,2.75 ; 16.75,-2.75 16.75,-3.75 17.25,-3.75 17.25,-2.75 ; 16.75,2.75 16.75,3.75 17.25,3.75 17.25,2.75 ; 18.75,-2.75 18.75,-3.75 19.25,-3.75 19.25,-2.75 ; 18.75,2.75 18.75,3.75 19.25,3.75 19.25,2.75 ; -23.625,-2.75 -23.625,2.75 23.625,2.75 23.625,-2.75 -23.625,-2.75
Mechanical 15:
  lines w0.05: -0.5,0 0.5,0 ; 0,-0.5 0,0.5 ; -23.975,-4.05 23.975,-4.05 23.975,4.05 -23.975,4.05 -23.975,-4.05
3D body "62534020621 (rev1).stp": height 8.55, standoff 0, extent -23.625,-3.75 23.625,3.75